# Altium footprint library PUSB3FR4Z.PcbLib: 3 footprints
Each footprint in its own frame and in the unit in brackets; x right, y up, seen from the top. Pads: shape width x height; smd on the part's side, far side on the other; paste and mask are expansions set on the pad; w line width, h text height; cw(c..) or ccw(c..) is an arc to the next point about the centre after c.
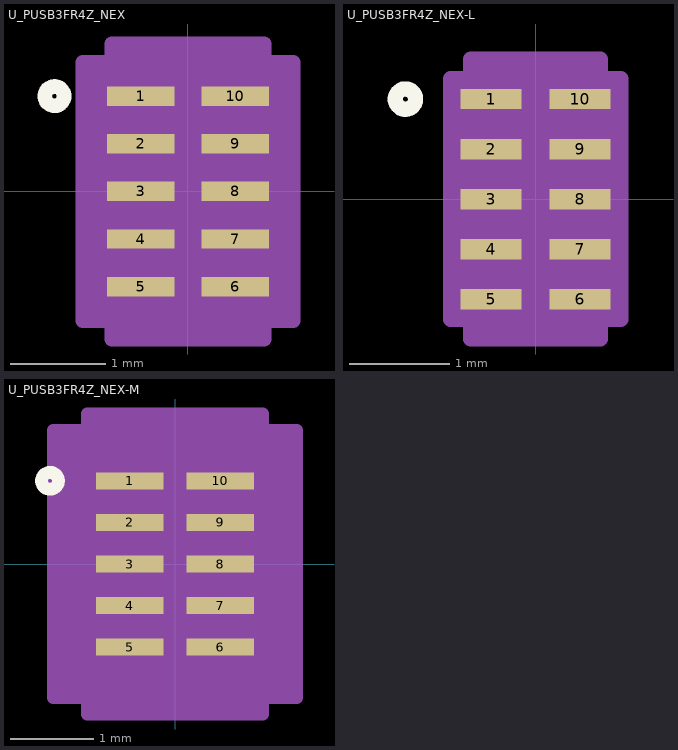
[diagram p0: the footprints below, top view; thin cyan lines are the x and y axes]

## U_PUSB3FR4Z_NEX [mil]
pads (10):
  rect 28x8 smd paste+0 mask+0: 1(-19.5,39.37) 2(-19.5,19.68) 3(-19.5,0) 4(-19.5,-19.68) 5(-19.5,-39.37) 6(19.5,-39.37) 7(19.5,-19.68) 8(19.5,0) 9(19.5,19.68) 10(19.5,39.37)
Top Overlay:
  circle w6: c-55.19,39.37 r4
  text ".Designator" at -137.5,-25 h50
Mechanical 13:
  circle w1: c-5.5,39.37 r3
  lines w1: -12,51 ccw(c0,51) 12,51 ; -21.5,-51 21.5,-51 21.5,51 -21.5,51 -21.5,-51
  text ".Designator" at -137.5,-25 h50
Mechanical 15:
  region: -31.5,-53.37 -43.5,-53.37 -43.5,53.37 -31.5,53.37 -31.5,61 31.5,61 31.5,53.37 43.5,53.37 43.5,-53.37 31.5,-53.37 31.5,-61 -31.5,-61
  lines w6: -43.5,-53.37 -43.5,53.37 -31.5,53.37 -31.5,61 31.5,61 31.5,53.37 43.5,53.37 43.5,-53.37 31.5,-53.37 31.5,-61 -31.5,-61 -31.5,-53.37 -43.5,-53.37
3D body "U_PUSB3FR4Z_NEX.step": height 20.12, standoff 0, extent -21.5,-50.98 21.5,50.98

## U_PUSB3FR4Z_NEX-L [mil]
pads (10):
  rect 24x8 smd paste+0 mask+0: 1(-17.5,39.37) 2(-17.5,19.68) 3(-17.5,0) 4(-17.5,-19.68) 5(-17.5,-39.37) 6(17.5,-39.37) 7(17.5,-19.68) 8(17.5,0) 9(17.5,19.68) 10(17.5,39.37)
Top Overlay:
  circle w6: c-51.19,39.37 r4
  text ".Designator" at -137.5,-25 h50
Mechanical 13:
  circle w1: c-5.5,39.37 r3
  lines w1: -12,51 ccw(c0,51) 12,51 ; -21.5,-51 21.5,-51 21.5,51 -21.5,51 -21.5,-51
  text ".Designator" at -137.5,-25 h50
Mechanical 15:
  region: -25.5,-47.37 -33.5,-47.37 -33.5,47.37 -25.5,47.37 -25.5,55 25.5,55 25.5,47.37 33.5,47.37 33.5,-47.37 25.5,-47.37 25.5,-55 -25.5,-55
  lines w6: -33.5,-47.37 -33.5,47.37 -25.5,47.37 -25.5,55 25.5,55 25.5,47.37 33.5,47.37 33.5,-47.37 25.5,-47.37 25.5,-55 -25.5,-55 -25.5,-47.37 -33.5,-47.37
3D body "U_PUSB3FR4Z_NEX.step": height 20.12, standoff 0, extent -21.5,-50.98 21.5,50.98

## U_PUSB3FR4Z_NEX-M [mil]
pads (10):
  rect 32x8 smd paste+0 mask+0: 1(-21.5,39.37) 2(-21.5,19.68) 3(-21.5,0) 4(-21.5,-19.68) 5(-21.5,-39.37) 6(21.5,-39.37) 7(21.5,-19.68) 8(21.5,0) 9(21.5,19.68) 10(21.5,39.37)
Top Overlay:
  circle w6: c-59.19,39.37 r4
  text ".Designator" at -137.5,-25 h50
Mechanical 13:
  circle w1: c-5.5,39.37 r3
  lines w1: -12,51 ccw(c0,51) 12,51 ; -21.5,-51 21.5,-51 21.5,51 -21.5,51 -21.5,-51
  text ".Designator" at -137.5,-25 h50
Mechanical 15:
  region: -41.5,-63.37 -57.5,-63.37 -57.5,63.37 -41.5,63.37 -41.5,71 41.5,71 41.5,63.37 57.5,63.37 57.5,-63.37 41.5,-63.37 41.5,-71 -41.5,-71
  lines w6: -57.5,-63.37 -57.5,63.37 -41.5,63.37 -41.5,71 41.5,71 41.5,63.37 57.5,63.37 57.5,-63.37 41.5,-63.37 41.5,-71 -41.5,-71 -41.5,-63.37 -57.5,-63.37
3D body "U_PUSB3FR4Z_NEX.step": height 20.12, standoff 0, extent -21.5,-50.98 21.5,50.98